# Altium footprint library EVQ-P2002M.PcbLib: 1 footprints
Each footprint in its own frame and in the unit in brackets; x right, y up, seen from the top. Pads: shape width x height; smd on the part's side, far side on the other; paste and mask are expansions set on the pad; w line width, h text height; cw(c..) or ccw(c..) is an arc to the next point about the centre after c.
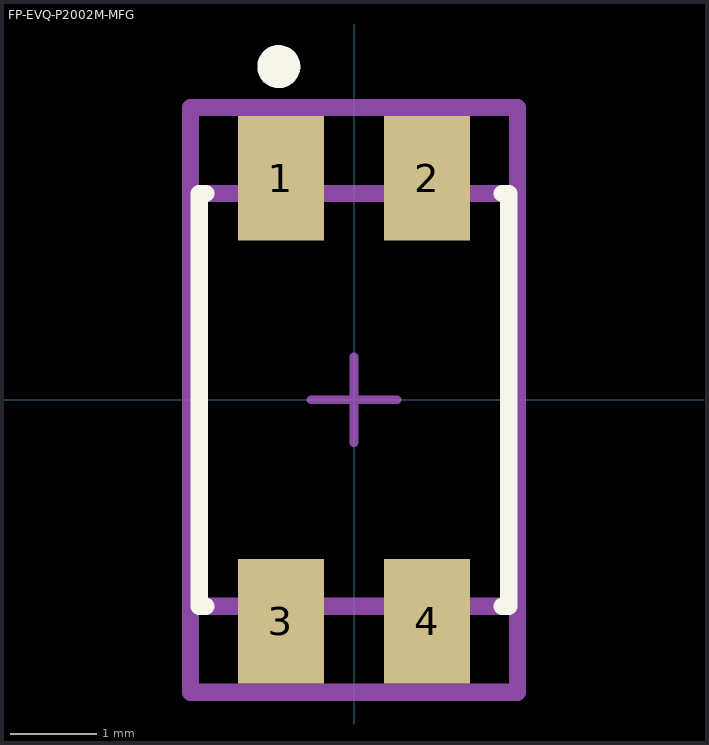
[diagram p0: the footprint, top view; thin cyan lines are the x and y axes]

## FP-EVQ-P2002M-MFG [mm]
pads (4):
  rect 1x1.45 smd paste+0 mask+0: 1(-0.85,2.575) 2(0.85,2.575) 3(-0.85,-2.575) 4(0.85,-2.575)
Top Overlay:
  circle w0.25: c-0.875,3.875 r0.125
  lines w0.2: -1.725,-2.4 -1.8,-2.4 -1.8,2.4 -1.725,2.4 ; 1.725,-2.4 1.8,-2.4 1.8,2.4 1.725,2.4
Top Assembly:
  lines w0.2: -1.9,-3.4 -1.9,3.4 1.9,3.4 1.9,-3.4 -1.9,-3.4
  text ".Designator" at 0,0.187 h1
Top 3D Body:
  lines w0.2: -1.8,-2.4 -1.8,2.4 1.8,2.4 1.8,-2.4 -1.8,-2.4
Top Courtyard:
  lines w0.2: -1.9,-3.4 -1.9,3.4 1.9,3.4 1.9,-3.4 -1.9,-3.4
Top Component Center:
  lines w0.1: -0.5,0 0.5,0 ; 0,-0.5 0,0.5
3D body "Switch_Panasonic_Electronic_Components_EVQ-P2002M_eec.STEP": height 0.25, standoff 0, extent -1.9,-3.4 1.9,3.4